# EAGLE library part 6130XX21021_61306421021 (library WR-PHD)
WR-PHD 2.54 mm THT Angled Dual Pin Header ARTICLE PROPERTIES: Pins:4;​ 6;​ 8;​ 10;​ 12;​ 14;​ 16;​ 18;​ 20;​ 22;​ 24;​ 26;​ 32;​ 34;​ 36;​ 40;​ 64;​ 72 KIND PROPERTIES: Pitch：2.54 mm Quality Class:3 as per CECC 75 301-802 Rows：Dual Gender：Pin Header Type：Angled;​ Board Stacker MATERIAL PROPERTIES: Insulator Material :PA6T Insulator Flammability Rating:UL94 V-0 Contact Material:Copper Alloy Contact Plating:Gold Contact Type:Stamped GENERAL INFORMATION Operating Temperature:-40 up to +105 °C Compliance:RoHS ELECTRICAL PROPERTIES: Rated Current:3 A IR 1:3 A Withstanding Voltage:500 V (AC) Contact Resistance:20 mΩ RISO:1000 MΩ CERTIFICATION UL Approval:E323964 PACKAGING PROPERTIES Packaging:Bag <https://katalog.we-online.com/media/images/v2/o33214v209%20Family_wr-phd_6130XX21021.jpg> Details see: https://katalog.we-online.com/en/em/PHD_2_54_THT_ANGLED_DUAL_PIN_HEADER_6130XX21021 Updated by Yingchun,Shan 2019-10-16 2019 (C) Würth Elektronik
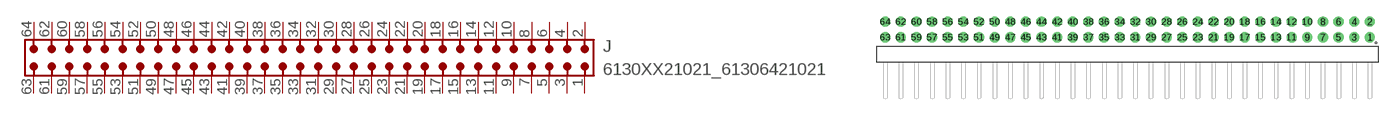
[diagram p73: symbol with the pads of 61306421021; footprint 61306421021]

Designator prefix J

## 6130XX21021_61306421021 (DATASHEET-URL: https://www.we-online.com/redexpert/spec/61306421021?ae; GENDER: Pin Header; IR: 3A; MOUNT: THT; PACKAGING: Bag; PART-NUMBER: 61306421021; PINS: 64; PITCH: 2.54 mm; ROWS: Dual; TYPE: Angled; VALUE: 61306421021)  [61306421021]
1  1  pas
2  2  pas
3  3  pas
4  4  pas
5  5  pas
6  6  pas
7  7  pas
8  8  pas
9  9  pas
10  10  pas
11  11  pas
12  12  pas
13  13  pas
14  14  pas
15  15  pas
16  16  pas
17  17  pas
18  18  pas
19  19  pas
20  20  pas
21  21  pas
22  22  pas
23  23  pas
24  24  pas
25  25  pas
26  26  pas
27  27  pas
28  28  pas
29  29  pas
30  30  pas
31  31  pas
32  32  pas
33  33  pas
34  34  pas
35  35  pas
36  36  pas
37  37  pas
38  38  pas
39  39  pas
40  40  pas
41  41  pas
42  42  pas
43  43  pas
44  44  pas
45  45  pas
46  46  pas
47  47  pas
48  48  pas
49  49  pas
50  50  pas
51  51  pas
52  52  pas
53  53  pas
54  54  pas
55  55  pas
56  56  pas
57  57  pas
58  58  pas
59  59  pas
60  60  pas
61  61  pas
62  62  pas
63  63  pas
64  64  pas

## Footprint 61306421021 (pad centres in mm)
WR-PHD 2.54 mm THT Angled Dual Pin Header, 64 Pins
drill 1.1: 1 39.37,2.77; 2 39.37,5.31; 3 36.83,2.77; 4 36.83,5.31; 5 34.29,2.77; 6 34.29,5.31; 7 31.75,2.77; 8 31.75,5.31; 9 29.21,2.77; 10 29.21,5.31; 11 26.67,2.77; 12 26.67,5.31; 13 24.13,2.77; 14 24.13,5.31; 15 21.59,2.77; 16 21.59,5.31; 17 19.05,2.77; 18 19.05,5.31; 19 16.51,2.77; 20 16.51,5.31; 21 13.97,2.77; 22 13.97,5.31; 23 11.43,2.77; 24 11.43,5.31; 25 8.89,2.77; 26 8.89,5.31; 27 6.35,2.77; 28 6.35,5.31; 29 3.81,2.77; 30 3.81,5.31; 31 1.27,2.77; 32 1.27,5.31; 33 -1.27,2.77; 34 -1.27,5.31; 35 -3.81,2.77; 36 -3.81,5.31; 37 -6.35,2.77; 38 -6.35,5.31; 39 -8.89,2.77; 40 -8.89,5.31; 41 -11.43,2.77; 42 -11.43,5.31; 43 -13.97,2.77; 44 -13.97,5.31; 45 -16.51,2.77; 46 -16.51,5.31; 47 -19.05,2.77; 48 -19.05,5.31; 49 -21.59,2.77; 50 -21.59,5.31; 51 -24.13,2.77; 52 -24.13,5.31; 53 -26.67,2.77; 54 -26.67,5.31; 55 -29.21,2.77; 56 -29.21,5.31; 57 -31.75,2.77; 58 -31.75,5.31; 59 -34.29,2.77; 60 -34.29,5.31; 61 -36.83,2.77; 62 -36.83,5.31; 63 -39.37,2.77; 64 -39.37,5.31